# Altium footprint library Power_vac.PcbLib: 50 footprints (part 2 of 4)
Each footprint in its own frame and in the unit in brackets; x right, y up, seen from the top. Pads: shape width x height; smd on the part's side, far side on the other; paste and mask are expansions set on the pad; w line width, h text height; cw(c..) or ccw(c..) is an arc to the next point about the centre after c.
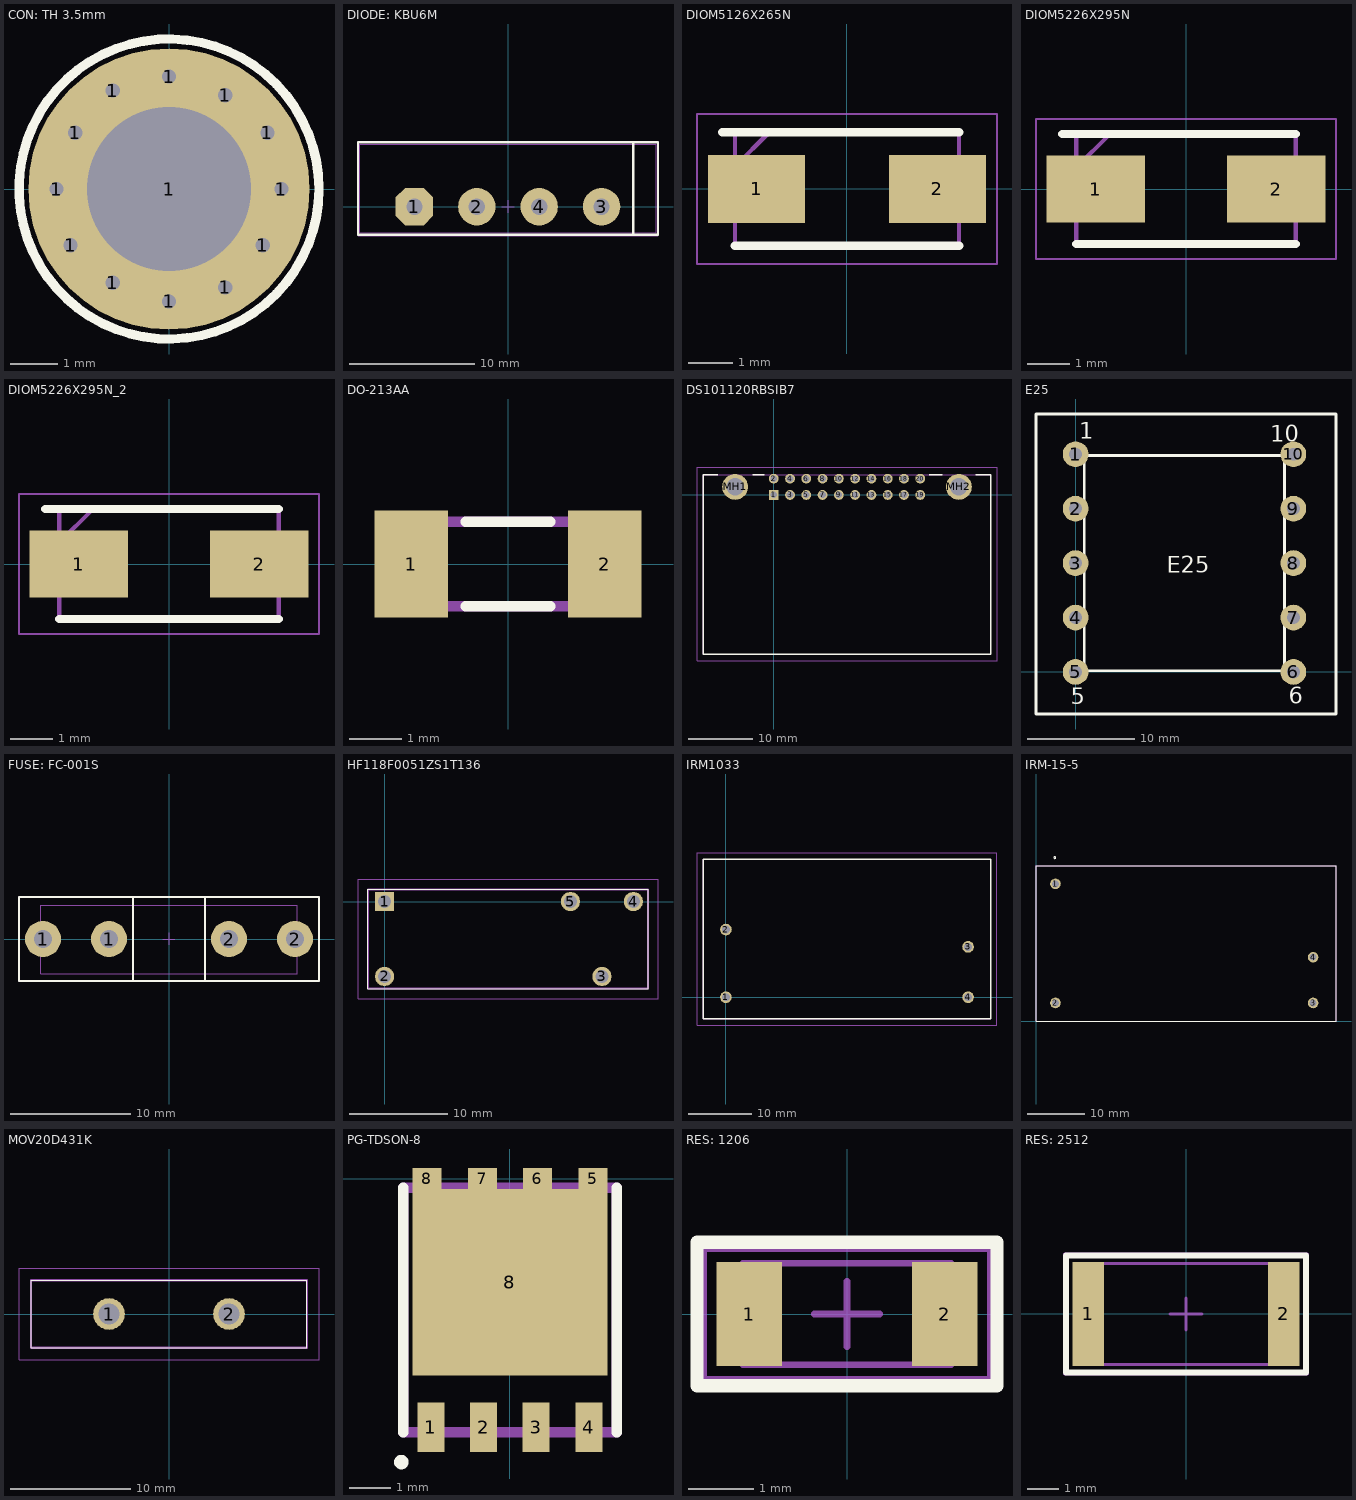
[diagram p1: the footprints below, top view; thin cyan lines are the x and y axes]

## CON: TH 3.5mm [mm]
pads (13):
  round 0.7 hole 0.3: 1(-2.4,0) 1(-2.1,-1.2) 1(-2,1.2) 1(-1.2,-2) 1(-1.2,2.1) 1(0,-2.4) 1(0,2.4) 1(1.2,-2.1) 1(1.2,2) 1(2,-1.2) 1(2.1,1.2) 1(2.4,0)
  round 6 hole 3.5: 1(0,0)
Top Overlay:
  circle w0.2: c0,0 r3.2

## DIODE: KBU6M [mm]
height 22
pads (4):
  oct 3x3 hole 1.3: 1(-7.5,0)
  round 3 hole 1.3: 2(-2.5,0) 3(7.5,0) 4(2.5,0)
Top Overlay:
  lines w0.2: 10.04,-2.25 10.04,5.15 ; -12.025,-2.25 12.025,-2.25 12.025,5.15 -12.025,5.15 -12.025,-2.25
Mechanical 1:
  lines w0.1: 10,-2.1 10,5 ; -11.875,-2.1 11.875,-2.1 11.875,5 -11.875,5 -11.875,-2.1
Mechanical 15:
  lines w0.1: -0.5,0 0.5,0 ; 0,-0.5 0,0.5 ; -12.025,-2.31 -12.025,5.15 12.025,5.15 12.025,-2.31 -12.025,-2.31
3D body "KBU6M.STEP": height 19.8, standoff -2, extent -11.85,-2.1 11.85,5

## DIOM5126X265N [mm]
pads (2):
  rect 2.2x1.55 smd: 1(-2.05,0) 2(2.05,0)
Top Overlay:
  lines w0.2: -2.825,1.288 2.538,1.288 ; -2.538,-1.288 2.538,-1.288
Mechanical 13:
  lines w0.1: -2.538,0.512 -1.762,1.288 ; -2.538,-1.288 -2.538,1.288 2.538,1.288 2.538,-1.288 -2.538,-1.288
Mechanical 15:
  lines w0.05: -3.4,-1.7 -3.4,1.7 3.4,1.7 3.4,-1.7 -3.4,-1.7
3D body "STTH112A.stp": height 2.35, standoff 0.01, extent -2.55,-1.275 2.55,1.275

## DIOM5226X295N [mm]
pads (2):
  rect 2.35x1.6 smd: 1(-2.15,0) 2(2.15,0)
Top Overlay:
  lines w0.2: -2.95,1.31 2.615,1.31 ; -2.615,-1.31 2.615,-1.31
Mechanical 13:
  lines w0.1: -2.615,0.51 -1.815,1.31 ; -2.615,-1.31 -2.615,1.31 2.615,1.31 2.615,-1.31 -2.615,-1.31
Mechanical 15:
  lines w0.05: -3.575,-1.67 -3.575,1.67 3.575,1.67 3.575,-1.67 -3.575,-1.67
3D body "ES1JTR.stp": height 2.95, standoff 0, extent -2.615,-1.31 2.615,1.31

## DIOM5226X295N_2 [mm]
pads (2):
  rect 2.35x1.6 smd: 1(-2.15,0) 2(2.15,0)
Top Overlay:
  lines w0.2: -2.95,1.31 2.615,1.31 ; -2.615,-1.31 2.615,-1.31
Mechanical 13:
  lines w0.1: -2.615,0.51 -1.815,1.31 ; -2.615,-1.31 2.615,-1.31 2.615,1.31 -2.615,1.31 -2.615,-1.31
Mechanical 15:
  lines w0.05: -3.575,-1.67 3.575,-1.67 3.575,1.67 -3.575,1.67 -3.575,-1.67
3D body "ES1JTR.stp": height 2.95, standoff 0, extent -2.615,-1.31 2.615,1.31

## DO-213AA [mm]
pads (2):
  rect 1.4x2.03 smd: 1(-1.84,0) 2(1.84,0)
Top Overlay:
  lines w0.2: -0.8,-0.8 0.8,-0.8 ; -0.8,0.8 0.8,0.8
Mechanical 13:
  lines w0.2: -1.75,-0.8 1.75,-0.8 1.75,0.8 -1.75,0.8 -1.75,-0.8
3D body "BZV55C15.stp": height 1.7, standoff 0, extent -1.855,-0.844 1.855,0.844

## DS101120RBSIB7 [mm]
pads (22):
  rect 1.53x1.53 hole 1.02: 1(0,0)
  round 1.53 hole 1.02: 2(0,2.54) 3(2.54,0) 4(2.54,2.54) 5(5.08,0) 6(5.08,2.54) 7(7.62,0) 8(7.62,2.54) 9(10.16,0) 10(10.16,2.54) 11(12.7,0) 12(12.7,2.54) 13(15.24,0) 14(15.24,2.54) 15(17.78,0) 16(17.78,2.54) 17(20.32,0) 18(20.32,2.54) 19(22.86,0) 20(22.86,2.54)
  round 4.05 hole 2.7: MH1(-6.02,1.27) MH2(28.88,1.27)
Top Overlay:
  lines w0.2: -10.97,-24.84 33.83,-24.84 ; -10.97,-24.84 33.83,-24.84 ; -10.97,-24.84 -10.97,3.16 ; -10.97,-24.84 -10.97,3.16 ; -10.97,3.16 -8.75,3.16 -10.97,3.16 ; 33.83,-24.84 33.83,3.16 ; 33.83,-24.84 33.83,3.16 ; 33.83,3.16 31.5,3.16 33.83,3.16 ; -3.25,3.16 -1.5,3.16 -3.25,3.16 ; 24.25,3.16 26.25,3.16 24.25,3.16
Mechanical 13:
  lines w0.1: -10.97,-24.84 33.83,-24.84 33.83,3.16 -10.97,3.16 -10.97,-24.84
Mechanical 15:
  lines w0.1: -11.97,-25.84 34.83,-25.84 34.83,4.305 -11.97,4.305 -11.97,-25.84
3D body "DS1011-20RBSIB7.stp": height 8.8, standoff -5, extent -10.97,-24.84 33.83,3.16

## E25 [mm]
pads (10):
  round 2.4 hole 1.2: 1(0,20.32) 2(0,15.24) 3(0,10.16) 4(0,5.08) 5(0,0) 6(20.32,0) 7(20.32,5.08) 8(20.32,10.16) 9(20.32,15.24) 10(20.32,20.32)
Top Overlay:
  lines w0.254: -3.7,-3.925 -3.7,24.075 24.3,24.075 24.3,-3.925 -3.7,-3.925 ; 0.8,0.1 0.8,20.2 19.5,20.2 19.5,0.1 0.8,0.1
  text "1" at 0.354,21.754 h1.52
  text "5" at -0.446,-3.021 h1.52
  text "10" at 18.179,21.479 h1.52
  text "6" at 19.904,-2.971 h1.52
  text "E25" at 8.504,9.254 h1.52

## FUSE: FC-001S [mm]
height 15
pads (4):
  round 3 hole 1.5: 1(-10.5,0) 1(-5,0) 2(5,0) 2(10.5,0)
Top Overlay:
  lines w0.2: -3,-3.5 -3,3.5 ; 3,-3.5 3,3.5 ; -12.5,-3.5 12.5,-3.5 12.5,3.5 -12.5,3.5 -12.5,-3.5
Mechanical 1:
  lines w0.1: -3,-2.9 -3,2.8 ; 3,-2.9 3,2.8 ; -10.7,-2.9 -10.7,2.8 10.7,2.8 10.7,-2.9 -10.7,-2.9
Mechanical 15:
  lines w0.1: -0.5,0 0.5,0 ; 0,-0.5 0,0.5 ; -12.5,-3.5 12.5,-3.5 12.5,3.5 -12.5,3.5 -12.5,-3.5
3D body "FC-001S.STEP": height 5.5, standoff -2.81, extent -10.7,-2.9 10.7,2.798

## HF118F0051ZS1T136 [mm]
pads (5):
  rect 1.95x1.95 hole 1.3: 1(0,0)
  round 1.95 hole 1.3: 2(0,-7.62) 3(22.1,-7.62) 4(25.3,0) 5(18.9,0)
Top Overlay:
  lines w0.1: -1.7,-8.86 26.8,-8.86 26.8,1.24 -1.7,1.24 -1.7,-8.86
Mechanical 13:
  lines w0.2: -1.7,-8.86 26.8,-8.86 26.8,1.24 -1.7,1.24 -1.7,-8.86
Mechanical 15:
  lines w0.1: -2.7,-9.86 27.8,-9.86 27.8,2.24 -2.7,2.24 -2.7,-9.86
3D body "HF118F_005-1ZS1T_136_.stp": height 12.9, standoff -5, extent -1.7,-8.86 26.8,1.24

## IRM1033 [mm]
pads (4):
  round 1.86 hole 1.24: 1(0,0) 2(0,10.75) 3(38.5,8) 4(38.5,0)
Top Overlay:
  lines w0.2: -3.6,-3.45 -3.6,21.95 42.1,21.95 42.1,-3.45 -3.6,-3.45
Mechanical 13:
  lines w0.1: -3.6,-3.45 -3.6,21.95 42.1,21.95 42.1,-3.45 -3.6,-3.45
Mechanical 15:
  lines w0.1: -4.6,-4.45 -4.6,22.95 43.1,22.95 43.1,-4.45 -4.6,-4.45
3D body "IRM-10-3.3.stp": height 21.6, standoff -5, extent -3.6,-3.45 42.1,21.95

## IRM-15-5 [mm]
pads (4):
  round 1.85 hole 1.24: 1(3.4,24) 2(3.4,3.2) 3(48.4,3.2) 4(48.4,11.2)
Top Overlay:
  circle w0.2: c3.28,28.59 r0.161
  lines w0.2: 0,0 0,27.2 52.4,27.2 52.4,0 0,0
Mechanical 13:
  lines w0.2: 0,0 52.4,0 52.4,27.2 0,27.2 0,0
3D body "IRM-15-24.stp": height 25.86, standoff -1.74, extent -0.1,0 52.3,27.2

## MOV20D431K [mm]
pads (2):
  round 2.64 hole 1.76: 1(-5,0) 2(5,0)
Top Overlay:
  lines w0.1: -11.5,-2.8 11.5,-2.8 11.5,2.8 -11.5,2.8 -11.5,-2.8
Mechanical 13:
  lines w0.2: -11.5,-2.8 11.5,-2.8 11.5,2.8 -11.5,2.8 -11.5,-2.8
Mechanical 15:
  lines w0.1: -12.5,-3.8 12.5,-3.8 12.5,3.8 -12.5,3.8 -12.5,-3.8
3D body "MOV-20D431K.stp": height 26.1, standoff -5, extent -11.5,-2.8 11.5,2.8

## PG-TDSON-8 [mm]
pads (9):
  rect 0.65x1.2 smd: 1(-1.905,-6) 2(-0.635,-6) 3(0.635,-6) 4(1.905,-6)
  rect 0.7x0.5 smd: 5(2,0) 6(0.665,0) 7(-0.665,0) 8(-2,0)
  rect 4.7x4.5 smd: 8(0,-2.5)
Top Overlay:
  circle w0.254: c-2.618,-6.839 r0.046
  lines w0.254: -2.575,-6.125 -2.575,-0.225 ; 2.575,-6.125 2.575,-0.225
Mechanical 13:
  lines w0.254: -2.575,-6.125 -2.575,-0.225 2.575,-0.225 2.575,-6.125 -2.575,-6.125
3D body "BSC123N08NS3GATMA1.stp": height 1.1, standoff 0, extent -2.895,-6.335 2.895,0.015

## RES: 1206 [mm]
height 0.6
pads (2):
  rect 1x1.6 smd: 1(-1.5,0) 2(1.5,0)
Top Overlay:
  lines w0.2: -2.3,-1.1 2.3,-1.1 2.3,1.1 -2.3,1.1 -2.3,-1.1
Mechanical 1:
  lines w0.1: -1.6,-0.775 1.6,-0.775 1.6,0.775 -1.6,0.775 -1.6,-0.775
Mechanical 15:
  lines w0.1: -0.5,0 0.5,0 ; 0,-0.5 0,0.5 ; -2.2,-1 -2.2,1 2.2,1 2.2,-1 -2.2,-1
3D body "chip_1206_r.STEP": height 0.47, standoff -0.03, extent -1.65,-0.8 1.55,0.8

## RES: 2512 [mm]
height 0.55
pads (2):
  rect 1x3.3 smd: 1(-3.1,0) 2(3.1,0)
Top Overlay:
  lines w0.2: -3.8,-1.85 3.8,-1.85 3.8,1.85 -3.8,1.85 -3.8,-1.85
Mechanical 1:
  lines w0.1: -3.175,-1.6 3.175,-1.6 3.175,1.6 -3.175,1.6 -3.175,-1.6
Mechanical 15:
  lines w0.1: -0.5,0 0.5,0 ; 0,-0.5 0,0.5 ; -3.85,-1.9 -3.85,1.9 3.85,1.9 3.85,-1.9 -3.85,-1.9
3D body "chip_2512_r.STEP": height 0.52, standoff -0.04, extent -3.175,-1.6 3.175,1.6